# Altium footprint library UPDI 6-pin header.PcbLib: 1 footprints
Each footprint in its own frame and in the unit in brackets; x right, y up, seen from the top. Pads: shape width x height; smd on the part's side, far side on the other; paste and mask are expansions set on the pad; w line width, h text height; cw(c..) or ccw(c..) is an arc to the next point about the centre after c.
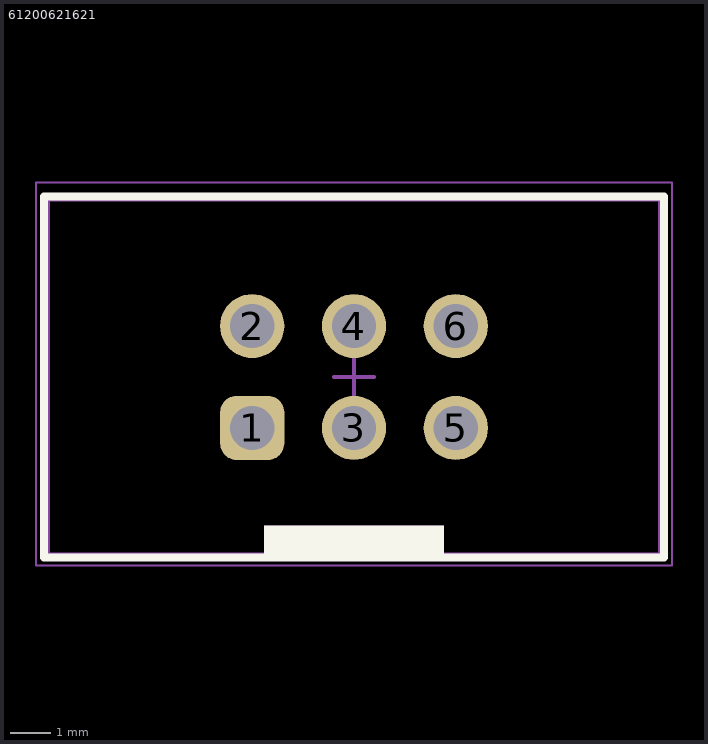
[diagram p0: the footprint, top view; thin cyan lines are the x and y axes]

## 61200621621 [mm] "6 pins, straight, gold plating"
height 9.1
pads (6):
  rrect50% 1.6x1.6 hole 1.1: 1(-1272.54,-1271.27)
  round 1.6 hole 1.1: 2(-1272.54,-1268.73) 3(-1270,-1271.27) 4(-1270,-1268.73) 5(-1267.46,-1271.27) 6(-1267.46,-1268.73)
Top Overlay:
  rectangle: -1272.25,-1274.5 -1267.75,-1273.7
  lines w0.2: -1277.74,-1274.5 -1262.26,-1274.5 -1262.26,-1265.5 -1277.74,-1265.5 -1277.74,-1274.5
Top Assembly:
  rectangle: -1272.25,-1274.425 -1267.75,-1273.7
  lines w0.1: -1277.64,-1274.425 -1277.64,-1265.575 -1262.36,-1265.575 -1262.36,-1274.425 -1277.64,-1274.425
Top Designator:
Top 3D Body:
  rectangle: -1272.25,-1274.425 -1267.75,-1273.7
  lines w0.1: -1277.64,-1274.425 -1262.36,-1274.425 -1262.36,-1265.575 -1277.64,-1265.575 -1277.64,-1274.425
Top Courtyard:
  lines w0.05: -1277.94,-1274.7 -1262.06,-1274.7 -1262.06,-1265.15 -1277.94,-1265.15 -1277.94,-1274.7
Top Component Center:
  lines w0.1: -1270.5,-1270 -1269.5,-1270 ; -1270,-1270.5 -1270,-1269.5
3D body "61200621621.stp": height 9.13, standoff -2.98, extent -1277.64,-1274.425 -1262.36,-1265.25